# EAGLE library part 6130XX216921_613012216921 (library WR-PHD)
WR-PHD 2.54 mm Dual Socket Header Bottom Entry Large Article Properties Pins 4 unitless; 6 unitless; 8 unitless; 10 unitless; 12 unitless; 16 unitless; 18 unitless; 20 unitless; 22 unitless; 24 unitless; 26 unitless; 32 unitless; 34 unitless; 40 unitless General Information Operating Temperature -40 °C up to +105 °C Pitch 2.54 mm Durability 25 Mating cycles Rows Dual Gender Socket Header Type Bottom Entry Large Material Properties Insulator Material Nylon 9T Insulator Flammability Rating UL94 V-0 Contact Material Copper Alloy Contact Plating Gold Contact Type Stamped Certification UL Approval E323964 Packaging Properties Packaging Tube Electrical Properties Withstanding Voltage 500 V (AC) Contact Resistance 20 mΩ RISO 1000 MΩ <https://www.we-online.com/components/media/o33194v209%20Family_WR-PDH_6130xx216921.jpg> Details see: www.we-online.com/en/components/products/PHD_2_54_DUAL_SOCKET_HEADER_BOTTOM_ENTRY_LARGE_6130XX216921 <www.we-online.com/catalog/PHD_2_54_DUAL_SOCKET_HEADER_BOTTOM_ENTRY_LARGE_6130XX216921/?utm_source=eagle_model&utm_medium=description_link&utm_campaign=eisos_eagle> Updated by Yingchun,Shan 2019-10-23 2019 (C) Würth Elektronik
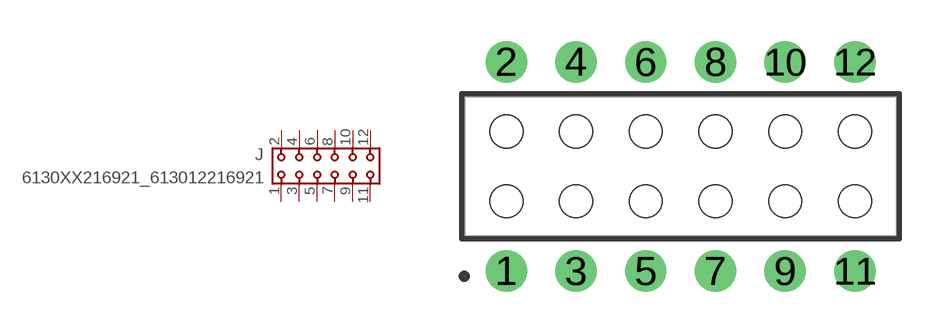
[diagram p199: symbol with the pads of 613012216921; footprint 613012216921]

Designator prefix J

## 6130XX216921_613012216921 (DATASHEET-URL: https://www.we-online.com/redexpert/spec/613012216921?ae; GENDER: Socket Header; IR: 3A; MOUNT: THT; PACKAGING: Tube; PART-NUMBER: 613012216921; PINS: 12; PITCH: 2.54 mm; ROWS: Dual; TYPE: Bottom Entry Large; VALUE: 613012216921)  [613012216921]
1  1  pas
2  2  pas
3  3  pas
4  4  pas
5  5  pas
6  6  pas
7  7  pas
8  8  pas
9  9  pas
10  10  pas
11  11  pas
12  12  pas

## Footprint 613012216921 (pad centres in mm)
WR-PHD 2.54 mm Dual Socket Header Bottom Entry Large, 12 Pins
drill 1: 1 -6.35,-3.81; 2 -6.35,3.81; 3 -3.81,-3.81; 4 -3.81,3.81; 5 -1.27,-3.81; 6 -1.27,3.81; 7 1.27,-3.81; 8 1.27,3.81; 9 3.81,-3.81; 10 3.81,3.81; 11 6.35,-3.81; 12 6.35,3.81
hole 1.2 at -6.35,1.27
hole 1.2 at -3.81,1.27
hole 1.2 at -3.81,-1.27
hole 1.2 at -6.35,-1.27
hole 1.2 at -1.27,1.27
hole 1.2 at -1.27,-1.27
hole 1.2 at 1.27,-1.27
hole 1.2 at 1.27,1.27
hole 1.2 at 3.81,1.27
hole 1.2 at 3.81,-1.27
hole 1.2 at 6.35,-1.27
hole 1.2 at 6.35,1.27